# Altium schematic symbol library Clema_CAP.SchLib: 2 symbols
Pins are listed as number, name and electrical type; pins without a type are passive.

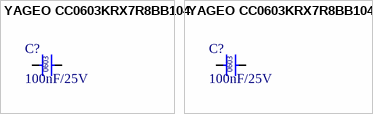
[diagram p0: symbols YAGEO CC0603KRX7R8BB104 to YAGEO CC0603KRX7R8BB104_1]

## YAGEO CC0603KRX7R8BB104
designator C?, comment 100nF/25V
CAP CER 100nF 25V X7R 0603; Manufacturer: YAGEO; Manufacturer Part Number: CC0603KRX7R8BB104; Type: SMD; DigiKey Part Number: 311-1341-2-ND; LCSC Part Number: C92490; Mouser Part Number: 603-CC603KPX7R8BB104; Package: 0603
footprint CAP_0603
pins: 1, 2

## YAGEO CC0603KRX7R8BB104_1
designator C?, comment 100nF/25V
CAP CER 100nF 25V X7R 0603; Manufacturer: YAGEO; Manufacturer Part Number: CC0603KRX7R8BB104; Type: SMD; DigiKey Part Number: 311-1341-2-ND; LCSC Part Number: C92490; Mouser Part Number: 603-CC603KPX7R8BB104; Package: 0603
footprint CAP_0603
pins: 1, 2